# Altium footprint library Package_DFN_QFN.PcbLib: 735 footprints (part 44 of 46)
Each footprint in its own frame and in the unit in brackets; x right, y up, seen from the top. Pads: shape width x height; smd on the part's side, far side on the other; paste and mask are expansions set on the pad; w line width, h text height; cw(c..) or ccw(c..) is an arc to the next point about the centre after c.
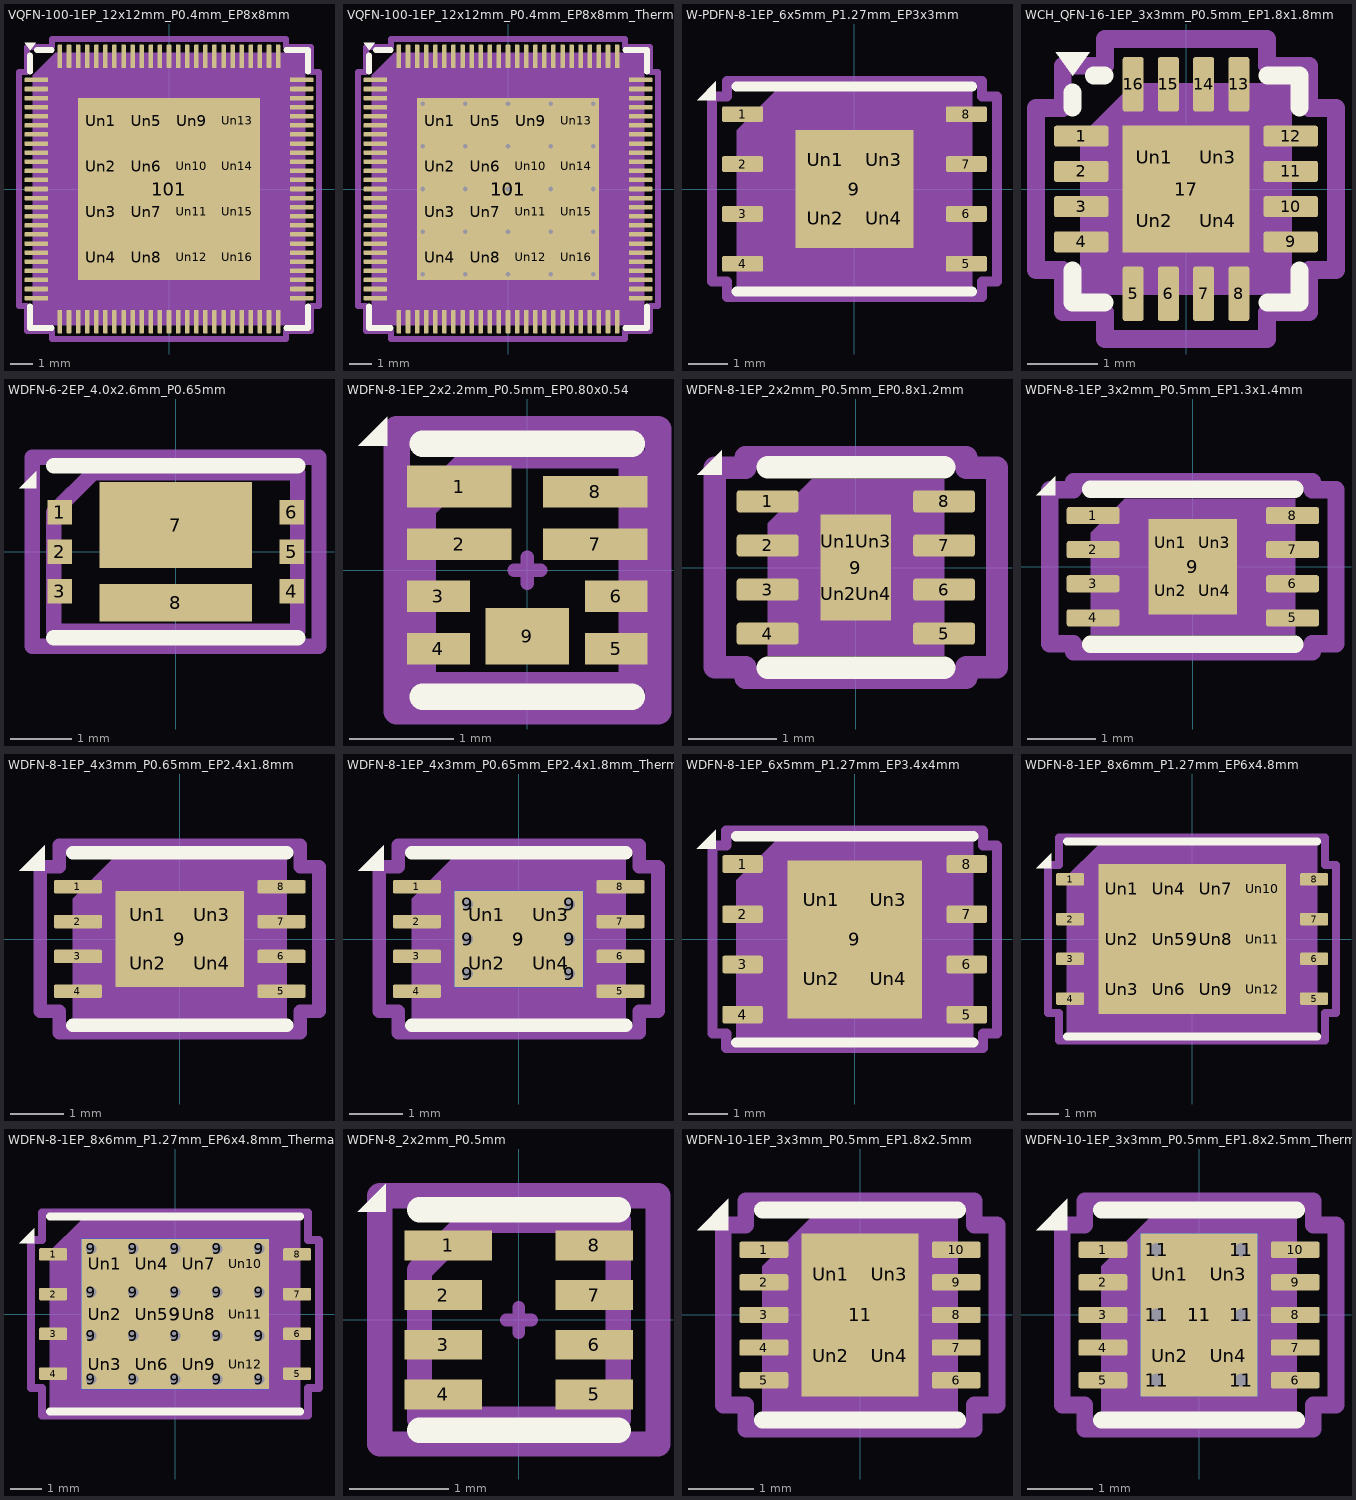
[diagram p43: the footprints below, top view; thin cyan lines are the x and y axes]

## VQFN-100-1EP_12x12mm_P0.4mm_EP8x8mm [mm] "VQFN-100-1EP_12x12mm_P0.4mm_EP8x8mm"
pads (117):
  rrect25% 1.025x0.2 smd: 1(-5.837,4.8) 2(-5.837,4.4) 3(-5.837,4) 4(-5.837,3.6) 5(-5.837,3.2) 6(-5.837,2.8) 7(-5.837,2.4) 8(-5.837,2) 9(-5.837,1.6) 10(-5.837,1.2) 11(-5.837,0.8) 12(-5.837,0.4) 13(-5.837,0) 14(-5.837,-0.4) 15(-5.837,-0.8) 16(-5.837,-1.2) 17(-5.837,-1.6) 18(-5.837,-2) 19(-5.837,-2.4) 20(-5.837,-2.8) 21(-5.837,-3.2) 22(-5.837,-3.6) 23(-5.837,-4) 24(-5.837,-4.4) 25(-5.837,-4.8) 51(5.837,-4.8) 52(5.837,-4.4) 53(5.837,-4) 54(5.837,-3.6) 55(5.837,-3.2) 56(5.837,-2.8) 57(5.837,-2.4) 58(5.837,-2) 59(5.837,-1.6) 60(5.837,-1.2) 61(5.837,-0.8) 62(5.837,-0.4) 63(5.837,0) 64(5.837,0.4) 65(5.837,0.8) 66(5.837,1.2) 67(5.837,1.6) 68(5.837,2) 69(5.837,2.4) 70(5.837,2.8) 71(5.837,3.2) 72(5.837,3.6) 73(5.837,4) 74(5.837,4.4) 75(5.837,4.8)
  rrect25% 0.2x1.025 smd: 26(-4.8,-5.837) 27(-4.4,-5.837) 28(-4,-5.837) 29(-3.6,-5.837) 30(-3.2,-5.837) 31(-2.8,-5.837) 32(-2.4,-5.837) 33(-2,-5.837) 34(-1.6,-5.837) 35(-1.2,-5.837) 36(-0.8,-5.837) 37(-0.4,-5.837) 38(0,-5.837) 39(0.4,-5.837) 40(0.8,-5.837) 41(1.2,-5.837) 42(1.6,-5.837) 43(2,-5.837) 44(2.4,-5.837) 45(2.8,-5.837) 46(3.2,-5.837) 47(3.6,-5.837) 48(4,-5.837) 49(4.4,-5.837) 50(4.8,-5.837) 76(4.8,5.837) 77(4.4,5.837) 78(4,5.837) 79(3.6,5.837) 80(3.2,5.837) 81(2.8,5.837) 82(2.4,5.837) 83(2,5.837) 84(1.6,5.837) 85(1.2,5.837) 86(0.8,5.837) 87(0.4,5.837) 88(0,5.837) 89(-0.4,5.837) 90(-0.8,5.837) 91(-1.2,5.837) 92(-1.6,5.837) 93(-2,5.837) 94(-2.4,5.837) 95(-2.8,5.837) 96(-3.2,5.837) 97(-3.6,5.837) 98(-4,5.837) 99(-4.4,5.837) 100(-4.8,5.837)
  rect 8x8 smd: 101(0,0)
  rrect16% 1.61x1.61 on Top Paste: Un1(-3,3) Un2(-3,1) Un3(-3,-1) Un4(-3,-3) Un5(-1,3) Un6(-1,1) Un7(-1,-1) Un8(-1,-3) Un9(1,3) Un10(1,1) Un11(1,-1) Un12(1,-3) Un13(3,3) Un14(3,1) Un15(3,-1) Un16(3,-3)
F.SilkS:
  region: -6.11,6.11 -6.35,6.44 -5.87,6.44
  lines w0.254: -6.11,-5.16 -6.11,-6.11 -5.16,-6.11 ; -6.11,5.16 -6.11,5.87 ; -5.81,6.11 -5.16,6.11 ; 5.16,-6.11 6.11,-6.11 6.11,-5.16 ; 5.16,6.11 6.11,6.11 6.11,5.16
Top Component Center:
  lines w0.127: -0.127,0 0.127,0 -0.127,0 ; 0,-0.127 0,0.127 0,-0.127
Top Assembly:
  region: 6,-6 -6,-6 -6,5 -5,6 6,6
Top Courtyard:
  lines w0.254: -6.6,-5.15 -6.25,-5.15 -6.25,-6.25 -5.15,-6.25 -5.15,-6.6 5.15,-6.6 5.15,-6.25 6.25,-6.25 6.25,-5.15 6.6,-5.15 6.6,5.15 6.25,5.15 6.25,6.25 5.15,6.25 5.15,6.6 -5.15,6.6 -5.15,6.25 -6.25,6.25 -6.25,5.15 -6.6,5.15 -6.6,-5.15
Top Designator:
  text ".Designator" at -3.43,-0.344 h1.52

## VQFN-100-1EP_12x12mm_P0.4mm_EP8x8mm_ThermalVias [mm] "VQFN-100-1EP_12x12mm_P0.4mm_EP8x8mm_ThermalVias"
pads (143):
  rrect25% 1.025x0.2 smd: 1(-5.837,4.8) 2(-5.837,4.4) 3(-5.837,4) 4(-5.837,3.6) 5(-5.837,3.2) 6(-5.837,2.8) 7(-5.837,2.4) 8(-5.837,2) 9(-5.837,1.6) 10(-5.837,1.2) 11(-5.837,0.8) 12(-5.837,0.4) 13(-5.837,0) 14(-5.837,-0.4) 15(-5.837,-0.8) 16(-5.837,-1.2) 17(-5.837,-1.6) 18(-5.837,-2) 19(-5.837,-2.4) 20(-5.837,-2.8) 21(-5.837,-3.2) 22(-5.837,-3.6) 23(-5.837,-4) 24(-5.837,-4.4) 25(-5.837,-4.8) 51(5.837,-4.8) 52(5.837,-4.4) 53(5.837,-4) 54(5.837,-3.6) 55(5.837,-3.2) 56(5.837,-2.8) 57(5.837,-2.4) 58(5.837,-2) 59(5.837,-1.6) 60(5.837,-1.2) 61(5.837,-0.8) 62(5.837,-0.4) 63(5.837,0) 64(5.837,0.4) 65(5.837,0.8) 66(5.837,1.2) 67(5.837,1.6) 68(5.837,2) 69(5.837,2.4) 70(5.837,2.8) 71(5.837,3.2) 72(5.837,3.6) 73(5.837,4) 74(5.837,4.4) 75(5.837,4.8)
  rrect25% 0.2x1.025 smd: 26(-4.8,-5.837) 27(-4.4,-5.837) 28(-4,-5.837) 29(-3.6,-5.837) 30(-3.2,-5.837) 31(-2.8,-5.837) 32(-2.4,-5.837) 33(-2,-5.837) 34(-1.6,-5.837) 35(-1.2,-5.837) 36(-0.8,-5.837) 37(-0.4,-5.837) 38(0,-5.837) 39(0.4,-5.837) 40(0.8,-5.837) 41(1.2,-5.837) 42(1.6,-5.837) 43(2,-5.837) 44(2.4,-5.837) 45(2.8,-5.837) 46(3.2,-5.837) 47(3.6,-5.837) 48(4,-5.837) 49(4.4,-5.837) 50(4.8,-5.837) 76(4.8,5.837) 77(4.4,5.837) 78(4,5.837) 79(3.6,5.837) 80(3.2,5.837) 81(2.8,5.837) 82(2.4,5.837) 83(2,5.837) 84(1.6,5.837) 85(1.2,5.837) 86(0.8,5.837) 87(0.4,5.837) 88(0,5.837) 89(-0.4,5.837) 90(-0.8,5.837) 91(-1.2,5.837) 92(-1.6,5.837) 93(-2,5.837) 94(-2.4,5.837) 95(-2.8,5.837) 96(-3.2,5.837) 97(-3.6,5.837) 98(-4,5.837) 99(-4.4,5.837) 100(-4.8,5.837)
  round 0.5 hole 0.2: 101(-3.75,-3.75) 101(-3.75,-1.875) 101(-3.75,0) 101(-3.75,1.875) 101(-3.75,3.75) 101(-1.875,-3.75) 101(-1.875,-1.875) 101(-1.875,0) 101(-1.875,1.875) 101(-1.875,3.75) 101(0,-3.75) 101(0,-1.875) 101(0,0) 101(0,1.875) 101(0,3.75) 101(1.875,-3.75) 101(1.875,-1.875) 101(1.875,0) 101(1.875,1.875) 101(1.875,3.75) 101(3.75,-3.75) 101(3.75,-1.875) 101(3.75,0) 101(3.75,1.875) 101(3.75,3.75)
  rect 8x8 smd: 101(0,0)
  rect 8x8 smd far side: 101(0,0)
  rrect16% 1.61x1.61 on Top Paste: Un1(-3,3) Un2(-3,1) Un3(-3,-1) Un4(-3,-3) Un5(-1,3) Un6(-1,1) Un7(-1,-1) Un8(-1,-3) Un9(1,3) Un10(1,1) Un11(1,-1) Un12(1,-3) Un13(3,3) Un14(3,1) Un15(3,-1) Un16(3,-3)
F.SilkS:
  region: -6.11,6.11 -6.35,6.44 -5.87,6.44
  lines w0.254: -6.11,-5.16 -6.11,-6.11 -5.16,-6.11 ; -6.11,5.16 -6.11,5.87 ; -5.81,6.11 -5.16,6.11 ; 5.16,-6.11 6.11,-6.11 6.11,-5.16 ; 5.16,6.11 6.11,6.11 6.11,5.16
Top Component Center:
  lines w0.127: -0.127,0 0.127,0 -0.127,0 ; 0,-0.127 0,0.127 0,-0.127
Top Assembly:
  region: 6,-6 -6,-6 -6,5 -5,6 6,6
Top Courtyard:
  lines w0.254: -6.6,-5.15 -6.25,-5.15 -6.25,-6.25 -5.15,-6.25 -5.15,-6.6 5.15,-6.6 5.15,-6.25 6.25,-6.25 6.25,-5.15 6.6,-5.15 6.6,5.15 6.25,5.15 6.25,6.25 5.15,6.25 5.15,6.6 -5.15,6.6 -5.15,6.25 -6.25,6.25 -6.25,5.15 -6.6,5.15 -6.6,-5.15
Top Designator:
  text ".Designator" at -3.43,-0.344 h1.52

## W-PDFN-8-1EP_6x5mm_P1.27mm_EP3x3mm [mm] "W-PDFN-8-1EP_6x5mm_P1.27mm_EP3x3mm"
pads (13):
  rrect25% 1.05x0.4 smd: 1(-2.85,1.905) 2(-2.85,0.635) 3(-2.85,-0.635) 4(-2.85,-1.905) 5(2.85,-1.905) 6(2.85,-0.635) 7(2.85,0.635) 8(2.85,1.905)
  rect 3x3 smd: 9(0,0)
  rrect21% 1.21x1.21 on Top Paste: Un1(-0.75,0.75) Un2(-0.75,-0.75) Un3(0.75,0.75) Un4(0.75,-0.75)
F.SilkS:
  region: -3.53,2.26 -4.01,2.26 -3.53,2.74
  lines w0.254: -3,-2.61 3,-2.61 ; -3,2.61 3,2.61
Top Component Center:
  lines w0.127: -0.127,0 0.127,0 -0.127,0 ; 0,-0.127 0,0.127 0,-0.127
Top Assembly:
  region: 3,-2.5 -3,-2.5 -3,1.5 -2,2.5 3,2.5
Top Courtyard:
  lines w0.254: -3.63,-2.36 -3.25,-2.36 -3.25,-2.75 3.25,-2.75 3.25,-2.36 3.63,-2.36 3.63,2.36 3.25,2.36 3.25,2.75 -3.25,2.75 -3.25,2.36 -3.63,2.36 -3.63,-2.36
Top Designator:
  text ".Designator" at -3.43,-0.344 h1.52
3D body "W-PDFN-8-1EP_6x5mm_P1.27mm_EP3x3mm.step": height 0.81, standoff 0, extent -3,-2.475 3,2.475

## WCH_QFN-16-1EP_3x3mm_P0.5mm_EP1.8x1.8mm [mm] "WCH_QFN-16-1EP_3x3mm_P0.5mm_EP1.8x1.8mm"
pads (21):
  rrect25% 0.775x0.3 smd: 1(-1.488,0.75) 2(-1.488,0.25) 3(-1.488,-0.25) 4(-1.488,-0.75) 9(1.488,-0.75) 10(1.488,-0.25) 11(1.488,0.25) 12(1.488,0.75)
  rrect25% 0.3x0.775 smd: 5(-0.75,-1.488) 6(-0.25,-1.488) 7(0.25,-1.488) 8(0.75,-1.488) 13(0.75,1.488) 14(0.25,1.488) 15(-0.25,1.488) 16(-0.75,1.488)
  rect 1.8x1.8 smd: 17(0,0)
  rrect25% 0.73x0.73 on Top Paste: Un1(-0.45,0.45) Un2(-0.45,-0.45) Un3(0.45,0.45) Un4(0.45,-0.45)
F.SilkS:
  region: -1.61,1.61 -1.85,1.94 -1.37,1.94
  lines w0.254: -1.61,-1.16 -1.61,-1.61 -1.16,-1.61 ; -1.61,1.16 -1.61,1.37 ; -1.31,1.61 -1.16,1.61 ; 1.16,-1.61 1.61,-1.61 1.61,-1.16 ; 1.16,1.61 1.61,1.61 1.61,1.16
Top Component Center:
  lines w0.127: -0.127,0 0.127,0 -0.127,0 ; 0,-0.127 0,0.127 0,-0.127
Top Assembly:
  region: 1.5,-1.5 -1.5,-1.5 -1.5,0.75 -0.75,1.5 1.5,1.5
Top Courtyard:
  lines w0.254: -2.13,-1.15 -1.75,-1.15 -1.75,-1.75 -1.15,-1.75 -1.15,-2.13 1.15,-2.13 1.15,-1.75 1.75,-1.75 1.75,-1.15 2.13,-1.15 2.13,1.15 1.75,1.15 1.75,1.75 1.15,1.75 1.15,2.13 -1.15,2.13 -1.15,1.75 -1.75,1.75 -1.75,1.15 -2.13,1.15 -2.13,-1.15
Top Designator:
  text ".Designator" at -3.43,-0.344 h1.52

## WDFN-6-2EP_4.0x2.6mm_P0.65mm [mm] "WDFN-6-2EP_4.0x2.6mm_P0.65mm"
pads (8):
  rect 0.4x0.4 smd: 1(-1.9,0.65) 2(-1.9,0) 3(-1.9,-0.65) 4(1.9,-0.65) 5(1.9,0) 6(1.9,0.65)
  rect 2.5x1.415 smd: 7(0,0.438)
  rect 2.5x0.615 smd: 8(0,-0.838)
F.SilkS:
  region: -2.29,1.04 -2.57,1.04 -2.29,1.32
  lines w0.254: -2,-1.41 2,-1.41 ; -2,1.41 2,1.41
Top Component Center:
  lines w0.127: -0.127,0 0.127,0 -0.127,0 ; 0,-0.127 0,0.127 0,-0.127
Top Assembly:
  lines w0.254: -2,-1.3 2,-1.3 2,1.3 -1.35,1.3 -2,0.65 -2,-1.3
Top Courtyard:
  lines w0.254: -2.35,-1.55 2.35,-1.55 2.35,1.55 -2.35,1.55 -2.35,-1.55
Top Designator:
  text ".Designator" at -3.43,-0.344 h1.52

## WDFN-8-1EP_2x2.2mm_P0.5mm_EP0.80x0.54 [mm] "WDFN-8-1EP_2x2.2mm_P0.5mm_EP0.80x0.54"
pads (9):
  rect 1x0.4 smd: 1(-0.65,0.8)
  rect 1x0.3 smd: 2(-0.65,0.25) 7(0.65,0.25) 8(0.65,0.75)
  rect 0.6x0.3 smd: 3(-0.85,-0.25) 4(-0.85,-0.75) 5(0.85,-0.75) 6(0.85,-0.25)
  rect 0.8x0.54 smd: 9(0,-0.63)
F.SilkS:
  region: -1.34,1.19 -1.62,1.19 -1.34,1.47
  lines w0.254: -1,-1.21 1,-1.21 ; -1,1.21 1,1.21
Top Component Center:
  lines w0.127: -0.127,0 0.127,0 -0.127,0 ; 0,-0.127 0,0.127 0,-0.127
Top Assembly:
  lines w0.254: -1,-1.1 1,-1.1 1,1.1 -0.5,1.1 -1,0.6 -1,-1.1
Top Courtyard:
  lines w0.254: -1.25,-1.35 1.25,-1.35 1.25,1.35 -1.25,1.35 -1.25,-1.35
Top Designator:
  text ".Designator" at -2.251,-0.226 h1

## WDFN-8-1EP_2x2mm_P0.5mm_EP0.8x1.2mm [mm] "WDFN-8-1EP_2x2mm_P0.5mm_EP0.8x1.2mm"
pads (13):
  rrect25% 0.7x0.25 smd: 1(-1,0.75) 2(-1,0.25) 3(-1,-0.25) 4(-1,-0.75) 5(1,-0.75) 6(1,-0.25) 7(1,0.25) 8(1,0.75)
  rect 0.8x1.2 smd: 9(0,0)
  rrect25% 0.32x0.48 on Top Paste: Un1(-0.2,0.3) Un2(-0.2,-0.3) Un3(0.2,0.3) Un4(0.2,-0.3)
F.SilkS:
  region: -1.52,1.05 -1.8,1.05 -1.52,1.33
  lines w0.254: -1,-1.135 1,-1.135 ; -1,1.135 1,1.135
Top Component Center:
  lines w0.127: -0.127,0 0.127,0 -0.127,0 ; 0,-0.127 0,0.127 0,-0.127
Top Assembly:
  region: 1,-1 -1,-1 -1,0.5 -0.5,1 1,1
Top Courtyard:
  lines w0.254: -1.6,-1.13 -1.25,-1.13 -1.25,-1.25 1.25,-1.25 1.25,-1.13 1.6,-1.13 1.6,1.13 1.25,1.13 1.25,1.25 -1.25,1.25 -1.25,1.13 -1.6,1.13 -1.6,-1.13
Top Designator:
  text ".Designator" at -2.251,-0.226 h1

## WDFN-8-1EP_3x2mm_P0.5mm_EP1.3x1.4mm [mm] "WDFN-8-1EP_3x2mm_P0.5mm_EP1.3x1.4mm"
pads (13):
  rrect25% 0.775x0.25 smd: 1(-1.462,0.75) 2(-1.462,0.25) 3(-1.462,-0.25) 4(-1.462,-0.75) 5(1.462,-0.75) 6(1.462,-0.25) 7(1.462,0.25) 8(1.462,0.75)
  rect 1.3x1.4 smd: 9(0,0)
  rrect25% 0.52x0.56 on Top Paste: Un1(-0.325,0.35) Un2(-0.325,-0.35) Un3(0.325,0.35) Un4(0.325,-0.35)
F.SilkS:
  region: -2.02,1.05 -2.3,1.05 -2.02,1.33
  lines w0.254: -1.5,-1.135 1.5,-1.135 ; -1.5,1.135 1.5,1.135
Top Component Center:
  lines w0.127: -0.127,0 0.127,0 -0.127,0 ; 0,-0.127 0,0.127 0,-0.127
Top Assembly:
  region: 1.5,-1 -1.5,-1 -1.5,0.5 -1,1 1.5,1
Top Courtyard:
  lines w0.254: -2.1,-1.13 -2.1,1.13 -1.75,1.13 -1.75,1.25 1.75,1.25 1.75,1.13 2.1,1.13 2.1,-1.13 1.75,-1.13 1.75,-1.25 -1.75,-1.25 -1.75,-1.13 -2.1,-1.13
Top Designator:
  text ".Designator" at -3.43,-0.344 h1.52

## WDFN-8-1EP_4x3mm_P0.65mm_EP2.4x1.8mm [mm] "WDFN-8-1EP_4x3mm_P0.65mm_EP2.4x1.8mm"
pads (13):
  rrect25% 0.9x0.25 smd: 1(-1.9,0.975) 2(-1.9,0.325) 3(-1.9,-0.325) 4(-1.9,-0.975) 5(1.9,-0.975) 6(1.9,-0.325) 7(1.9,0.325) 8(1.9,0.975)
  rect 2.4x1.8 smd: 9(0,0)
  rrect25% 0.97x0.73 on Top Paste: Un1(-0.6,0.45) Un2(-0.6,-0.45) Un3(0.6,0.45) Un4(0.6,-0.45)
F.SilkS:
  region: -2.52,1.27 -3,1.27 -2.52,1.75
  lines w0.254: -2,-1.61 2,-1.61 ; -2,1.61 2,1.61
Top Component Center:
  lines w0.127: -0.127,0 0.127,0 -0.127,0 ; 0,-0.127 0,0.127 0,-0.127
Top Assembly:
  region: 2,-1.5 -2,-1.5 -2,0.75 -1.25,1.5 2,1.5
Top Courtyard:
  lines w0.254: -2.6,-1.35 -2.6,1.35 -2.25,1.35 -2.25,1.75 2.25,1.75 2.25,1.35 2.6,1.35 2.6,-1.35 2.25,-1.35 2.25,-1.75 -2.25,-1.75 -2.25,-1.35 -2.6,-1.35
Top Designator:
  text ".Designator" at -3.43,-0.344 h1.52
3D body "WDFN-8-1EP_4x3mm_P0.65mm_EP2.4x1.8mm.step": height 0.85, standoff 0, extent -2,-1.475 2,1.475

## WDFN-8-1EP_4x3mm_P0.65mm_EP2.4x1.8mm_ThermalVias [mm] "WDFN-8-1EP_4x3mm_P0.65mm_EP2.4x1.8mm_ThermalVias"
pads (20):
  rrect25% 0.9x0.25 smd: 1(-1.9,0.975) 2(-1.9,0.325) 3(-1.9,-0.325) 4(-1.9,-0.975) 5(1.9,-0.975) 6(1.9,-0.325) 7(1.9,0.325) 8(1.9,0.975)
  round 0.5 hole 0.2: 9(-0.95,-0.65) 9(-0.95,0) 9(-0.95,0.65) 9(0.95,-0.65) 9(0.95,0) 9(0.95,0.65)
  rect 2.4x1.8 smd: 9(0,0)
  rect 2.4x1.8 smd far side: 9(0,0)
  rrect25% 0.97x0.73 on Top Paste: Un1(-0.6,0.45) Un2(-0.6,-0.45) Un3(0.6,0.45) Un4(0.6,-0.45)
F.SilkS:
  region: -2.52,1.27 -3,1.27 -2.52,1.75
  lines w0.254: -2,-1.61 2,-1.61 ; -2,1.61 2,1.61
Top Component Center:
  lines w0.127: -0.127,0 0.127,0 -0.127,0 ; 0,-0.127 0,0.127 0,-0.127
Top Assembly:
  region: 2,-1.5 -2,-1.5 -2,0.75 -1.25,1.5 2,1.5
Top Courtyard:
  lines w0.254: -2.6,-1.35 -2.25,-1.35 -2.25,-1.75 2.25,-1.75 2.25,-1.35 2.6,-1.35 2.6,1.35 2.25,1.35 2.25,1.75 -2.25,1.75 -2.25,1.35 -2.6,1.35 -2.6,-1.35
Top Designator:
  text ".Designator" at -3.43,-0.344 h1.52
3D body "WDFN-8-1EP_4x3mm_P0.65mm_EP2.4x1.8mm.step": height 0.85, standoff 0, extent -2,-1.475 2,1.475

## WDFN-8-1EP_6x5mm_P1.27mm_EP3.4x4mm [mm] "WDFN-8-1EP_6x5mm_P1.27mm_EP3.4x4mm"
pads (13):
  rrect25% 1.025x0.45 smd: 1(-2.838,1.905) 2(-2.838,0.635) 3(-2.838,-0.635) 4(-2.838,-1.905) 5(2.838,-1.905) 6(2.838,-0.635) 7(2.838,0.635) 8(2.838,1.905)
  rect 3.4x4 smd: 9(0,0)
  rrect18% 1.37x1.61 on Top Paste: Un1(-0.85,1) Un2(-0.85,-1) Un3(0.85,1) Un4(0.85,-1)
F.SilkS:
  region: -3.51,2.29 -3.99,2.29 -3.51,2.77
  lines w0.254: -3,-2.61 3,-2.61 ; -3,2.61 3,2.61
Top Component Center:
  lines w0.127: -0.127,0 0.127,0 -0.127,0 ; 0,-0.127 0,0.127 0,-0.127
Top Assembly:
  region: 3,-2.5 -3,-2.5 -3,1.5 -2,2.5 3,2.5
Top Courtyard:
  lines w0.254: -3.6,-2.38 -3.6,2.38 -3.25,2.38 -3.25,2.75 3.25,2.75 3.25,2.38 3.6,2.38 3.6,-2.38 3.25,-2.38 3.25,-2.75 -3.25,-2.75 -3.25,-2.38 -3.6,-2.38
Top Designator:
  text ".Designator" at -3.43,-0.344 h1.52

## WDFN-8-1EP_8x6mm_P1.27mm_EP6x4.8mm [mm] "WDFN-8-1EP_8x6mm_P1.27mm_EP6x4.8mm"
pads (21):
  rrect25% 0.9x0.4 smd: 1(-3.9,1.905) 2(-3.9,0.635) 3(-3.9,-0.635) 4(-3.9,-1.905) 5(3.9,-1.905) 6(3.9,-0.635) 7(3.9,0.635) 8(3.9,1.905)
  rect 6x4.8 smd: 9(0,0)
  rrect21% 1.21x1.29 on Top Paste: Un1(-2.25,1.6) Un2(-2.25,0) Un3(-2.25,-1.6) Un4(-0.75,1.6) Un5(-0.75,0) Un6(-0.75,-1.6) Un7(0.75,1.6) Un8(0.75,0) Un9(0.75,-1.6) Un10(2.25,1.6) Un11(2.25,0) Un12(2.25,-1.6)
F.SilkS:
  region: -4.51,2.26 -4.99,2.26 -4.51,2.74
  lines w0.254: -4,-3.11 4,-3.11 ; -4,3.11 4,3.11
Top Component Center:
  lines w0.127: -0.127,0 0.127,0 -0.127,0 ; 0,-0.127 0,0.127 0,-0.127
Top Assembly:
  region: 4,-3 -4,-3 -4,2 -3,3 4,3
Top Courtyard:
  lines w0.254: -4.6,-2.36 -4.25,-2.36 -4.25,-3.25 4.25,-3.25 4.25,-2.36 4.6,-2.36 4.6,2.36 4.25,2.36 4.25,3.25 -4.25,3.25 -4.25,2.36 -4.6,2.36 -4.6,-2.36
Top Designator:
  text ".Designator" at -3.43,-0.344 h1.52

## WDFN-8-1EP_8x6mm_P1.27mm_EP6x4.8mm_ThermalVias [mm] "WDFN-8-1EP_8x6mm_P1.27mm_EP6x4.8mm_ThermalVias"
pads (42):
  rrect25% 0.9x0.4 smd: 1(-3.9,1.905) 2(-3.9,0.635) 3(-3.9,-0.635) 4(-3.9,-1.905) 5(3.9,-1.905) 6(3.9,-0.635) 7(3.9,0.635) 8(3.9,1.905)
  round 0.63 hole 0.33: 9(-2.685,-2.085) 9(-2.685,-0.695) 9(-2.685,0.695) 9(-2.685,2.085) 9(-1.342,-2.085) 9(-1.342,-0.695) 9(-1.342,0.695) 9(-1.342,2.085) 9(0,-2.085) 9(0,-0.695) 9(0,0.695) 9(0,2.085) 9(1.342,-2.085) 9(1.342,-0.695) 9(1.342,0.695) 9(1.342,2.085) 9(2.685,-2.085) 9(2.685,-0.695) 9(2.685,0.695) 9(2.685,2.085)
  rect 6x4.8 smd: 9(0,0)
  rect 6x4.8 smd far side: 9(0,0)
  rrect21% 1.21x1.29 on Top Paste: Un1(-2.25,1.6) Un2(-2.25,0) Un3(-2.25,-1.6) Un4(-0.75,1.6) Un5(-0.75,0) Un6(-0.75,-1.6) Un7(0.75,1.6) Un8(0.75,0) Un9(0.75,-1.6) Un10(2.25,1.6) Un11(2.25,0) Un12(2.25,-1.6)
F.SilkS:
  region: -4.51,2.26 -4.99,2.26 -4.51,2.74
  lines w0.254: -4,-3.11 4,-3.11 ; -4,3.11 4,3.11
Top Component Center:
  lines w0.127: -0.127,0 0.127,0 -0.127,0 ; 0,-0.127 0,0.127 0,-0.127
Top Assembly:
  region: 4,-3 -4,-3 -4,2 -3,3 4,3
Top Courtyard:
  lines w0.254: -4.6,-2.36 -4.6,2.36 -4.25,2.36 -4.25,3.25 4.25,3.25 4.25,2.36 4.6,2.36 4.6,-2.36 4.25,-2.36 4.25,-3.25 -4.25,-3.25 -4.25,-2.36 -4.6,-2.36
Top Designator:
  text ".Designator" at -3.43,-0.344 h1.52

## WDFN-8_2x2mm_P0.5mm [mm] "WDFN-8_2x2mm_P0.5mm"
pads (8):
  rect 0.88x0.3 smd: 1(-0.71,0.75)
  rect 0.78x0.3 smd: 2(-0.76,0.25) 3(-0.76,-0.25) 4(-0.76,-0.75) 5(0.76,-0.75) 6(0.76,-0.25) 7(0.76,0.25) 8(0.76,0.75)
F.SilkS:
  region: -1.34,1.09 -1.62,1.09 -1.34,1.37
  lines w0.254: -1,-1.11 1,-1.11 ; -1,1.11 1,1.11
Top Component Center:
  lines w0.127: -0.127,0 0.127,0 -0.127,0 ; 0,-0.127 0,0.127 0,-0.127
Top Assembly:
  lines w0.254: -1,-1 1,-1 1,1 -0.5,1 -1,0.5 -1,-1
Top Courtyard:
  lines w0.254: -1.4,-1.25 1.4,-1.25 1.4,1.25 -1.4,1.25 -1.4,-1.25
Top Designator:
  text ".Designator" at -2.251,-0.226 h1

## WDFN-10-1EP_3x3mm_P0.5mm_EP1.8x2.5mm [mm] "WDFN-10-1EP_3x3mm_P0.5mm_EP1.8x2.5mm"
pads (15):
  rrect25% 0.75x0.25 smd: 1(-1.475,1) 2(-1.475,0.5) 3(-1.475,0) 4(-1.475,-0.5) 5(-1.475,-1) 6(1.475,-1) 7(1.475,-0.5) 8(1.475,0) 9(1.475,0.5) 10(1.475,1)
  rect 1.8x2.5 smd: 11(0,0)
  rrect25% 0.73x1.01 on Top Paste: Un1(-0.45,0.625) Un2(-0.45,-0.625) Un3(0.45,0.625) Un4(0.45,-0.625)
F.SilkS:
  region: -2.02,1.3 -2.5,1.3 -2.02,1.78
  lines w0.254: -1.5,-1.61 1.5,-1.61 ; -1.5,1.61 1.5,1.61
Top Component Center:
  lines w0.127: -0.127,0 0.127,0 -0.127,0 ; 0,-0.127 0,0.127 0,-0.127
Top Assembly:
  region: 1.5,-1.5 -1.5,-1.5 -1.5,0.75 -0.75,1.5 1.5,1.5
Top Courtyard:
  lines w0.254: -2.1,-1.38 -1.75,-1.38 -1.75,-1.75 1.75,-1.75 1.75,-1.38 2.1,-1.38 2.1,1.38 1.75,1.38 1.75,1.75 -1.75,1.75 -1.75,1.38 -2.1,1.38 -2.1,-1.38
Top Designator:
  text ".Designator" at -3.43,-0.344 h1.52

## WDFN-10-1EP_3x3mm_P0.5mm_EP1.8x2.5mm_ThermalVias [mm] "WDFN-10-1EP_3x3mm_P0.5mm_EP1.8x2.5mm_ThermalVias"
pads (22):
  rrect25% 0.75x0.25 smd: 1(-1.475,1) 2(-1.475,0.5) 3(-1.475,0) 4(-1.475,-0.5) 5(-1.475,-1) 6(1.475,-1) 7(1.475,-0.5) 8(1.475,0) 9(1.475,0.5) 10(1.475,1)
  round 0.5 hole 0.2: 11(-0.65,-1) 11(-0.65,0) 11(-0.65,1) 11(0.65,-1) 11(0.65,0) 11(0.65,1)
  rect 1.8x2.5 smd: 11(0,0)
  rect 1.8x2.5 smd far side: 11(0,0)
  rrect25% 0.73x1.01 on Top Paste: Un1(-0.45,0.625) Un2(-0.45,-0.625) Un3(0.45,0.625) Un4(0.45,-0.625)
F.SilkS:
  region: -2.02,1.3 -2.5,1.3 -2.02,1.78
  lines w0.254: -1.5,-1.61 1.5,-1.61 ; -1.5,1.61 1.5,1.61
Top Component Center:
  lines w0.127: -0.127,0 0.127,0 -0.127,0 ; 0,-0.127 0,0.127 0,-0.127
Top Assembly:
  region: 1.5,-1.5 -1.5,-1.5 -1.5,0.75 -0.75,1.5 1.5,1.5
Top Courtyard:
  lines w0.254: -2.1,-1.38 -1.75,-1.38 -1.75,-1.75 1.75,-1.75 1.75,-1.38 2.1,-1.38 2.1,1.38 1.75,1.38 1.75,1.75 -1.75,1.75 -1.75,1.38 -2.1,1.38 -2.1,-1.38
Top Designator:
  text ".Designator" at -3.43,-0.344 h1.52